# Altium footprint library Ezlo.PcbLib: 103 footprints (part 1 of 7)
Each footprint in its own frame and in the unit in brackets; x right, y up, seen from the top. Pads: shape width x height; smd on the part's side, far side on the other; paste and mask are expansions set on the pad; w line width, h text height; cw(c..) or ccw(c..) is an arc to the next point about the centre after c.
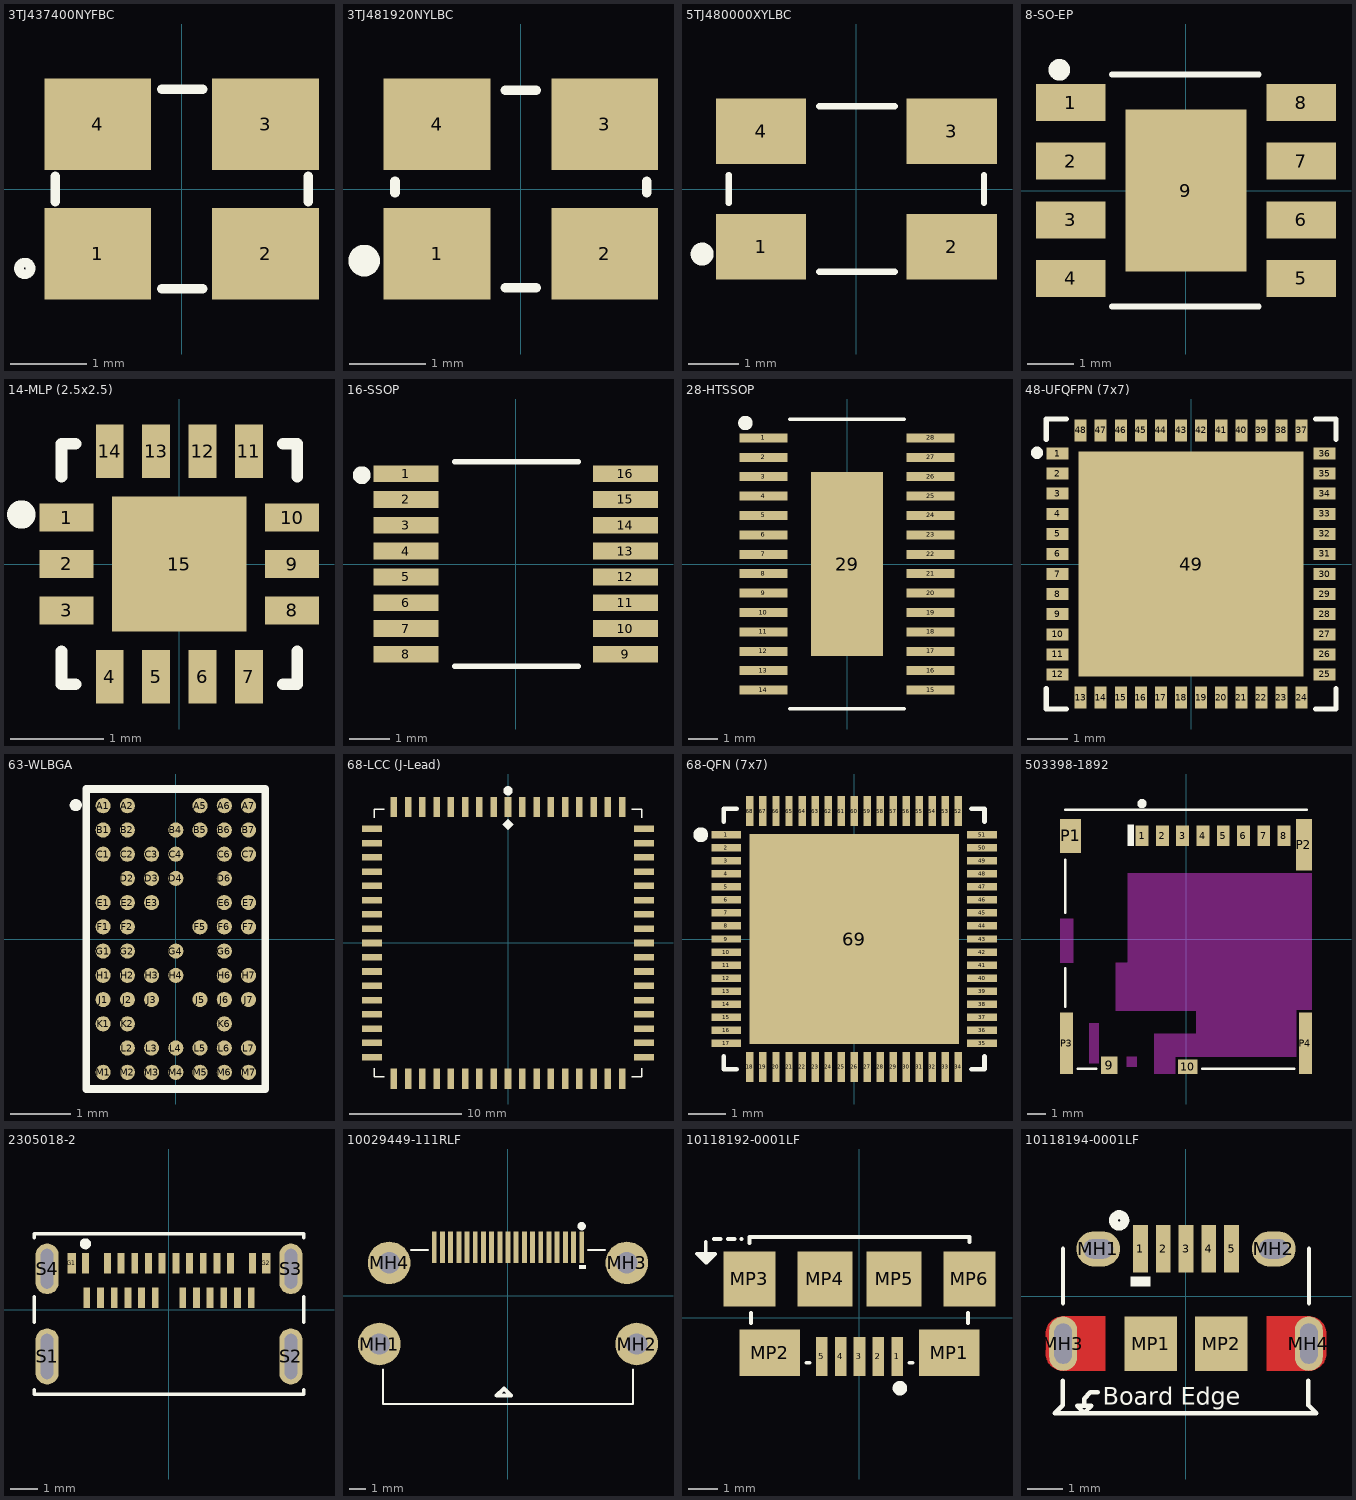
[diagram p0: the footprints below, top view; thin cyan lines are the x and y axes]

## 3TJ437400NYFBC [mm]
pads (4):
  rect 1.4x1.2 smd: 1(-1.1,-0.85) 2(1.1,-0.85) 3(1.1,0.85) 4(-1.1,0.85)
Top Overlay:
  circle w0.127: c-2.057,-1.041 r0.076
  lines w0.127: -1.659,-0.166 -1.659,0.164 ; -0.262,-1.307 0.272,-1.307 ; -0.262,1.307 0.272,1.307 ; 1.659,-0.166 1.659,0.164
3D body "User Library-Crystal_ECX-32.STEP": height 0.82, standoff 0, extent -1.6,-1.25 1.6,1.25

## 3TJ481920NYLBC [mm]
pads (4):
  rect 1.4x1.2 smd mask+0.07: 1(-1.1,-0.85) 2(1.1,-0.85) 3(1.1,0.85) 4(-1.1,0.85)
Top Overlay:
  circle w0.254: c-2.057,-0.94 r0.08
  lines w0.127: -1.651,-0.051 -1.651,0.102 ; -0.203,-1.295 0.203,-1.295 ; -0.203,1.295 0.203,1.295 ; 1.651,-0.051 1.651,0.102
3D body "User Library-XTAL-3_2x2_5.step": height 0.91, standoff -0.01, extent -1.6,-1.25 1.6,1.25

## 5TJ480000XYLBC [mm]
pads (4):
  rect 1.8x1.3 smd mask+0.07: 1(-1.9,-1.15) 2(1.9,-1.15) 3(1.9,1.15) 4(-1.9,1.15)
Top Overlay:
  circle w0.254: c-3.073,-1.295 r0.102
  lines w0.127: -2.54,-0.279 -2.54,0.279 ; -0.737,-1.651 0.762,-1.651 ; -0.737,1.651 0.762,1.651 ; 2.54,-0.279 2.54,0.279
3D body "User Library-CRYSTALSMD5X32.step": height 1, standoff 0, extent -2.5,-1.6 2.5,1.6

## 8-SO-EP [mm]
pads (9):
  rect 1.505x0.802 smd: 1(-2.497,1.905) 2(-2.497,0.635) 3(-2.497,-0.635) 4(-2.497,-1.905) 5(2.498,-1.905) 6(2.498,-0.635) 7(2.498,0.635) 8(2.498,1.905)
  rect 2.613x3.502 smd: 9(0,0)
Top Overlay:
  circle w0.254: c-2.743,2.616 r0.108
  lines w0.127: -1.6,-2.515 1.575,-2.515 ; -1.6,2.515 1.575,2.515
3D body "AP64501SP-13.STEP": height 1.7, standoff 0, extent -3,-2.45 3,2.45

## 14-MLP (2.5x2.5) [mm]
pads (15):
  rect 0.58x0.3 smd: 1(-1.215,0.5) 2(-1.215,0) 3(-1.215,-0.5) 8(1.215,-0.5) 9(1.215,0) 10(1.215,0.5)
  rect 0.3x0.58 smd: 4(-0.75,-1.215) 5(-0.25,-1.215) 6(0.25,-1.215) 7(0.75,-1.215) 11(0.75,1.215) 12(0.25,1.215) 13(-0.25,1.215) 14(-0.75,1.215)
  rect 1.45x1.45 smd: 15(0,0)
Top Overlay:
  circle w0.254: c-1.702,0.533 r0.025
  lines w0.127: -1.27,-0.94 -1.27,-1.295 -1.118,-1.295 ; -1.27,0.94 -1.27,1.295 -1.118,1.295 ; 1.118,-1.295 1.27,-1.295 1.27,-0.94 ; 1.118,1.295 1.27,1.295 1.27,0.94
3D body "MLP14_2P5X2P5_ONS.step": height 0.76, standoff 0, extent -1.245,-1.245 1.245,1.245

## 16-SSOP [mm]
pads (16):
  rect 1.6x0.41 smd: 1(-2.7,2.222) 2(-2.7,1.587) 3(-2.7,0.953) 4(-2.7,0.318) 5(-2.7,-0.318) 6(-2.7,-0.953) 7(-2.7,-1.587) 8(-2.7,-2.222) 9(2.7,-2.222) 10(2.7,-1.587) 11(2.7,-0.953) 12(2.7,-0.318) 13(2.7,0.318) 14(2.7,0.953) 15(2.7,1.587) 16(2.7,2.222)
Top Overlay:
  circle w0.254: c-3.785,2.184 r0.092
  lines w0.127: -1.499,-2.515 1.549,-2.515 ; -1.499,2.515 1.549,2.515
3D body "DBQ0016A.stp": height 1.62, standoff 0, extent -3.011,-2.451 3.011,2.451

## 28-HTSSOP [mm]
pads (29):
  rect 1.6x0.3 smd: 1(-2.8,4.225) 2(-2.8,3.575) 3(-2.8,2.925) 4(-2.8,2.275) 5(-2.8,1.625) 6(-2.8,0.975) 7(-2.8,0.325) 8(-2.8,-0.325) 9(-2.8,-0.975) 10(-2.8,-1.625) 11(-2.8,-2.275) 12(-2.8,-2.925) 13(-2.8,-3.575) 14(-2.8,-4.225) 15(2.8,-4.225) 16(2.8,-3.575) 17(2.8,-2.925) 18(2.8,-2.275) 19(2.8,-1.625) 20(2.8,-0.975) 21(2.8,-0.325) 22(2.8,0.325) 23(2.8,0.975) 24(2.8,1.625) 25(2.8,2.275) 26(2.8,2.925) 27(2.8,3.575) 28(2.8,4.225)
  rect 2.4x6.17 smd: 29(0,0)
Top Overlay:
  circle w0.254: c-3.404,4.724 r0.114
  lines w0.127: -1.905,-4.851 1.905,-4.851 ; -1.905,4.851 1.905,4.851
3D body "TPA3111D1PWPR.STEP": height 1.2, standoff 0, extent -3.2,-4.85 3.2,4.85

## 48-UFQFPN (7x7) [mm]
pads (49):
  rect 0.55x0.3 smd: 1(-3.325,2.75) 2(-3.325,2.25) 3(-3.325,1.75) 4(-3.325,1.25) 5(-3.325,0.75) 6(-3.325,0.25) 7(-3.325,-0.25) 8(-3.325,-0.75) 9(-3.325,-1.25) 10(-3.325,-1.75) 11(-3.325,-2.25) 12(-3.325,-2.75) 25(3.325,-2.75) 26(3.325,-2.25) 27(3.325,-1.75) 28(3.325,-1.25) 29(3.325,-0.75) 30(3.325,-0.25) 31(3.325,0.25) 32(3.325,0.75) 33(3.325,1.25) 34(3.325,1.75) 35(3.325,2.25) 36(3.325,2.75)
  rect 0.3x0.55 smd: 13(-2.75,-3.325) 14(-2.25,-3.325) 15(-1.75,-3.325) 16(-1.25,-3.325) 17(-0.75,-3.325) 18(-0.25,-3.325) 19(0.25,-3.325) 20(0.75,-3.325) 21(1.25,-3.325) 22(1.75,-3.325) 23(2.25,-3.325) 24(2.75,-3.325) 37(2.75,3.325) 38(2.25,3.325) 39(1.75,3.325) 40(1.25,3.325) 41(0.75,3.325) 42(0.25,3.325) 43(-0.25,3.325) 44(-0.75,3.325) 45(-1.25,3.325) 46(-1.75,3.325) 47(-2.25,3.325) 48(-2.75,3.325)
  rect 5.6x5.6 smd: 49(0,0)
Top Overlay:
  circle w0.254: c-3.835,2.769 r0.025
  lines w0.127: -3.607,-3.099 -3.607,-3.607 -3.099,-3.607 ; -3.607,3.099 -3.607,3.607 -3.099,3.607 ; 3.099,-3.607 3.607,-3.607 3.607,-3.099 ; 3.099,3.607 3.607,3.607 3.607,3.099
3D body "UFQFPN-48_7X7X0P55MM.step": height 0.61, standoff 0, extent -3.556,-3.556 3.556,3.556

## 63-WLBGA [mm]
pads (63):
  round 0.25 smd mask+0.055: A1(-1.2,2.2) A2(-0.8,2.2) A5(0.4,2.2) A6(0.8,2.2) A7(1.2,2.2) B1(-1.2,1.8) B2(-0.8,1.8) B4(0,1.8) B5(0.4,1.8) B6(0.8,1.8) B7(1.2,1.8) C1(-1.2,1.4) C2(-0.8,1.4) C3(-0.4,1.4) C4(0,1.4) C6(0.8,1.4) C7(1.2,1.4) D2(-0.8,1) D3(-0.4,1) D4(0,1) D6(0.8,1) E1(-1.2,0.6) E2(-0.8,0.6) E3(-0.4,0.6) E6(0.8,0.6) E7(1.2,0.6) F1(-1.2,0.2) F2(-0.8,0.2) F5(0.4,0.2) F6(0.8,0.2) F7(1.2,0.2) G1(-1.2,-0.2) G2(-0.8,-0.2) G4(0,-0.2) G6(0.8,-0.2) H1(-1.2,-0.6) H2(-0.8,-0.6) H3(-0.4,-0.6) H4(0,-0.6) H6(0.8,-0.6) H7(1.2,-0.6) J1(-1.2,-1) J2(-0.8,-1) J3(-0.4,-1) J5(0.4,-1) J6(0.8,-1) J7(1.2,-1) K1(-1.2,-1.4) K2(-0.8,-1.4) K6(0.8,-1.4) L2(-0.8,-1.8) L3(-0.4,-1.8) L4(0,-1.8) L5(0.4,-1.8) L6(0.8,-1.8) L7(1.2,-1.8) M1(-1.2,-2.2) M2(-0.8,-2.2) M3(-0.4,-2.2) M4(0,-2.2) M5(0.4,-2.2) M6(0.8,-2.2) M7(1.2,-2.2)
Top Overlay:
  circle w0.1: c-1.651,2.21 r0.05
  lines w0.127: -1.476,-2.476 1.476,-2.476 1.476,2.476 -1.476,2.476 -1.476,-2.476
3D body "BGA-63.step": height 0.56, standoff 0, extent -1.46,-2.464 1.46,2.464

## 68-LCC (J-Lead) [mil]
pads (68):
  rect 23x71 smd: 1(0,476) 2(-50,476) 3(-100,476) 4(-150,476) 5(-200,476) 6(-250,476) 7(-300,476) 8(-350,476) 9(-400,476) 27(-400,-476) 28(-350,-476) 29(-300,-476) 30(-250,-476) 31(-200,-476) 32(-150,-476) 33(-100,-476) 34(-50,-476) 35(0,-476) 36(50,-476) 37(100,-476) 38(150,-476) 39(200,-476) 40(250,-476) 41(300,-476) 42(350,-476) 43(400,-476) 61(400,476) 62(350,476) 63(300,476) 64(250,476) 65(200,476) 66(150,476) 67(100,476) 68(50,476)
  rect 71x23 smd: 10(-476,400) 11(-476,350) 12(-476,300) 13(-476,250) 14(-476,200) 15(-476,150) 16(-476,100) 17(-476,50) 18(-476,0) 19(-476,-50) 20(-476,-100) 21(-476,-150) 22(-476,-200) 23(-476,-250) 24(-476,-300) 25(-476,-350) 26(-476,-400) 44(476,-400) 45(476,-350) 46(476,-300) 47(476,-250) 48(476,-200) 49(476,-150) 50(476,-100) 51(476,-50) 52(476,0) 53(476,50) 54(476,100) 55(476,150) 56(476,200) 57(476,250) 58(476,300) 59(476,350) 60(476,400)
Top Overlay:
  circle w19.68: c0,533 r6.32
  rectangle: -1,405.98 7.01,426.98
  rectangle: -7,405 0,426
  lines w5: -468,-438 -468,-468 -434,-468 ; -468,438 -468,468 -434,468 ; 434,-468 468,-468 468,-438 ; 434,468 468,468 468,438
  lines w10: -14,415 0,401 14,415 0,429 -14,415
3D body "FN0068A.stp": height 171, standoff 0.27, extent -495,-495 495,495

## 68-QFN (7x7) [mm]
pads (69):
  rect 0.8x0.2 smd: 1(-3.435,2.8) 2(-3.435,2.45) 3(-3.435,2.1) 4(-3.435,1.75) 5(-3.435,1.4) 6(-3.435,1.05) 7(-3.435,0.7) 8(-3.435,0.35) 9(-3.435,0) 10(-3.435,-0.35) 11(-3.435,-0.7) 12(-3.435,-1.05) 13(-3.435,-1.4) 14(-3.435,-1.75) 15(-3.435,-2.1) 16(-3.435,-2.45) 17(-3.435,-2.8) 35(3.435,-2.8) 36(3.435,-2.45) 37(3.435,-2.1) 38(3.435,-1.75) 39(3.435,-1.4) 40(3.435,-1.05) 41(3.435,-0.7) 42(3.435,-0.35) 43(3.435,0) 44(3.435,0.35) 45(3.435,0.7) 46(3.435,1.05) 47(3.435,1.4) 48(3.435,1.75) 49(3.435,2.1) 50(3.435,2.45) 51(3.435,2.8)
  rect 0.2x0.8 smd: 18(-2.8,-3.435) 19(-2.45,-3.435) 20(-2.1,-3.435) 21(-1.75,-3.435) 22(-1.4,-3.435) 23(-1.05,-3.435) 24(-0.7,-3.435) 25(-0.35,-3.435) 26(0,-3.435) 27(0.35,-3.435) 28(0.7,-3.435) 29(1.05,-3.435) 30(1.4,-3.435) 31(1.75,-3.435) 32(2.1,-3.435) 33(2.45,-3.435) 34(2.8,-3.435) 52(2.8,3.435) 53(2.45,3.435) 54(2.1,3.435) 55(1.75,3.435) 56(1.4,3.435) 57(1.05,3.435) 58(0.7,3.435) 59(0.35,3.435) 60(0,3.435) 61(-0.35,3.435) 62(-0.7,3.435) 63(-1.05,3.435) 64(-1.4,3.435) 65(-1.75,3.435) 66(-2.1,3.435) 67(-2.45,3.435) 68(-2.8,3.435)
  rect 5.63x5.63 smd paste-4: 69(0,0)
Top Overlay:
  circle w0.2: c-4.121,2.8 r0.1
  lines w0.127: -3.5,-3.15 -3.5,-3.5 -3.15,-3.5 ; -3.5,3.15 -3.5,3.5 -3.15,3.5 ; 3.15,-3.5 3.5,-3.5 3.5,-3.15 ; 3.15,3.5 3.5,3.5 3.5,3.15
3D body "User Library-QFN35P700X700X80_HS-69N.STEP": height 0.8, standoff 0, extent -3.51,-3.51 3.51,3.51

## 503398-1892 [mm]
pads (14):
  rect 0.7x1.1 smd: 1(-2.38,5.625) 2(-1.28,5.625) 3(-0.18,5.625) 4(0.92,5.625) 5(2.02,5.625) 6(3.12,5.625) 7(4.22,5.625) 8(5.32,5.625)
  rect 0.9x0.93 smd: 9(-4.17,-6.84)
  rect 1.05x0.78 smd: 10(0.095,-6.915)
  rect 1.14x1.83 smd: P1(-6.26,5.61)
  rect 0.86x2.8 smd: P2(6.4,5.125)
  rect 0.7x3.33 smd: P3(-6.48,-5.64) P4(6.48,-5.64)
Top Overlay:
  circle w0.3: c-2.388,7.366 r0.1
  rectangle: -3.175,5.055 -2.819,6.223
  lines w0.127: -6.55,-3.675 -6.55,-1.575 ; -6.55,1.425 -6.55,4.325 ; -6.55,7.025 6.55,7.025 ; -5.876,-7.025 -4.874,-7.025 ; 0.874,-7.025 5.876,-7.025
Keep-Out Layer:
  region: 6.83,-3.835 5.994,-3.835 5.994,-6.375 -0.584,-6.375 -0.584,-7.305 -1.73,-7.305 -1.73,-5.125 0.57,-5.125 0.57,-3.875 -3.82,-3.875 -3.82,-1.275 -3.17,-1.275 -3.17,3.581 6.83,3.581
  region: -6.13,-1.276 -6.836,-1.276 -6.836,1.125 -6.13,1.125
  region: -4.75,-6.738 -5.245,-6.738 -5.245,-4.575 -4.75,-4.575
  region: -2.67,-6.93 -3.223,-6.93 -3.223,-6.375 -2.67,-6.375
3D body "5033981892--3DModel-STEP-1.STEP": height 1.4, standoff 0, extent -6.553,-7.085 6.547,6.985

## 2305018-2 [mm]
pads (30):
  rect 0.25x0.75 smd: A1(-3.05,1.7) A2(-2.25,1.7) A3(-1.75,1.7) A4(-1.25,1.7) A5(-0.75,1.7) A6(-0.25,1.7) A7(0.25,1.7) A8(0.75,1.7) A9(1.25,1.7) A10(1.75,1.7) A11(2.25,1.7) A12(3.05,1.7) B1(3,0.45) B2(2.5,0.45) B3(2,0.45) B4(1.5,0.45) B5(1,0.45) B6(0.5,0.45) B7(-0.5,0.45) B8(-1,0.45) B9(-1.5,0.45) B10(-2,0.45) B11(-2.5,0.45) B12(-3,0.45)
  rect 0.3x0.75 smd: G1(-3.55,1.7) G2(3.55,1.7)
  oval 0.85x2.05 hole 0.45 slot 1.65 at 90 deg: S1(-4.45,-1.7) S2(4.45,-1.7)
  oval 0.85x1.85 hole 0.45 slot 1.45 at 90 deg: S3(4.45,1.5) S4(-4.45,1.5)
Top Overlay:
  circle w0.2: c-3.05,2.413 r0.1
  lines w0.127: -4.925,-2.906 -4.925,-3.075 4.925,-3.075 4.925,-2.906 ; -4.925,-0.444 -4.925,0.48 ; -4.925,2.634 -4.925,2.775 4.925,2.775 4.925,2.634 ; 4.925,-0.444 4.925,0.48
3D body "2305018-2--3DModel-STEP-56544.STEP": height 3.53, standoff -0.53, extent -4.919,-5.856 4.919,2.794

## 10029449-111RLF [mm]
pads (23):
  rect 0.3x1.9 smd: 1(4.5,2.95) 2(4,2.95) 3(3.5,2.95) 4(3,2.95) 5(2.5,2.95) 6(2,2.95) 7(1.5,2.95) 8(1,2.95) 9(0.5,2.95) 10(0,2.95) 11(-0.5,2.95) 12(-1,2.95) 13(-1.5,2.95) 14(-2,2.95) 15(-2.5,2.95) 16(-3,2.95) 17(-3.5,2.95) 18(-4,2.95) 19(-4.5,2.95)
  round 2.6 hole 1.3: MH1(-7.85,-2.95) MH2(7.85,-2.95) MH3(7.25,2) MH4(-7.25,2)
Top Overlay:
  circle w0.254: c4.496,4.242 r0.127
  rectangle: 4.318,1.626 4.75,1.88
  lines w0.127: -7.62,-4.496 -7.62,-6.604 7.62,-6.604 7.62,-4.496 ; -5.918,2.794 -4.877,2.794 ; 4.877,2.794 5.918,2.794
  lines w0.254: -0.686,-6.096 -0.254,-5.664 0.178,-6.096 -0.686,-6.096
3D body "10029449-111RLF.stp": height 6.28, standoff -1.86, extent -8.354,-6.553 7.846,3.547

## 10118192-0001LF [mm] "CONN RCPT USB2.0 MICRO B SMD R/A"
pads (11):
  rect 0.4x1.35 smd: 1(1.3,-1.338) 2(0.65,-1.338) 3(0,-1.338) 4(-0.65,-1.338) 5(-1.3,-1.338)
  rect 2.1x1.6 smd: MP1(3.1,-1.212) MP2(-3.1,-1.212)
  rect 1.8x1.9 smd: MP3(-3.8,1.338) MP6(3.8,1.338)
  rect 1.9x1.9 smd: MP4(-1.2,1.338) MP5(1.2,1.338)
Top Overlay:
  circle w0.3: c1.397,-2.438 r0.1
  rectangle: -5.461,2.007 -5.131,2.204
  lines w0.127: -5.309,2.611 -5.309,1.9 -5.613,2.204 -4.978,2.204 -5.283,1.9 ; -5.029,2.718 -4.801,2.718 ; -4.547,2.718 -4.318,2.718 ; -4.089,2.718 -4.064,2.718 ; -3.8,2.575 -3.8,2.788 3.8,2.788 3.8,2.611 ; -3.75,-0.188 -3.75,0.162 ; -1.83,-1.563 -1.72,-1.563 ; 1.72,-1.563 1.83,-1.563 ; 3.75,-0.188 3.75,0.162
3D body "10118192C.stp": height 2.74, standoff -0.27, extent -3.95,-1.575 3.962,4.086

## 10118194-0001LF [mm]
pads (11):
  rect 0.42x1.35 smd: 1(-1.3,1.35) 2(-0.65,1.35) 3(0,1.35) 4(0.65,1.35) 5(1.3,1.35)
  oval 1.25x1 hole 0.55 slot 0.85 at 0 deg: MH1(-2.5,1.35) MH2(2.5,1.35)
  oval 0.8x1.55 hole 0.5 slot 1.15 at 90 deg: MH3(-3.5,-1.35) MH4(3.5,-1.35)
  rect 1.5x1.55 smd: MP1(-1,-1.35) MP2(1,-1.35)
Top Layer:
  region: 192 vertices and 0 holes, not listed, extent -4,-2.125 -2.3,-0.57
  region: 192 vertices and 0 holes, not listed, extent 2.3,-2.13 4,-0.575
Top Overlay:
  circle w0.254: c-1.905,2.163 r0.163
  rectangle: -1.575,0.283 -1.016,0.563
  lines w0.127: -3.511,-3.104 -3.511,-2.404 ; -3.511,-3.099 -3.511,-3.109 -3.739,-3.338 3.718,-3.338 3.489,-3.109 ; -3.505,-0.199 -3.505,1.35 ; -2.521,-2.74 -2.725,-2.74 -2.902,-2.918 -2.902,-3.121 ; 3.489,-3.104 3.489,-2.404 ; 3.505,-0.199 3.505,1.35 ; -2.902,-3.121 -3.106,-3.121 -2.942,-3.285 -2.862,-3.285 -2.699,-3.121 -2.902,-3.121
  text "Board Edge" at -2.367,-3.088 h0.5
3D body "10118194-0001LF--3DModel-STEP-56544.STEP": height 2.87, standoff -0.4, extent -4.017,-3.988 4.033,1.542